# Altium footprint library SOCKET mikroBUS 16 TH.PcbLib: 1 footprints
Each footprint in its own frame and in the unit in brackets; x right, y up, seen from the top. Pads: shape width x height; smd on the part's side, far side on the other; paste and mask are expansions set on the pad; w line width, h text height; cw(c..) or ccw(c..) is an arc to the next point about the centre after c.
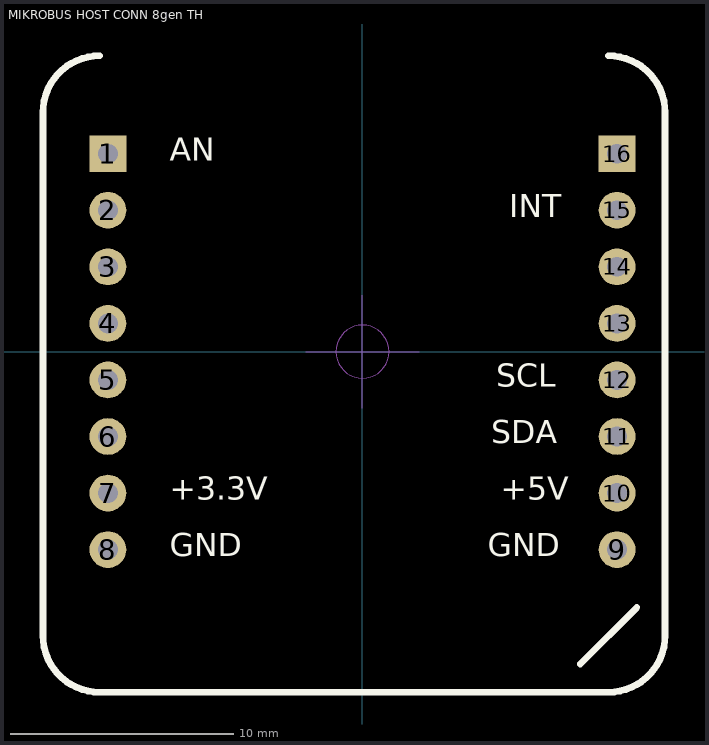
[diagram p0: the footprint, top view; thin cyan lines are the x and y axes]

## MIKROBUS HOST CONN 8gen TH [mil]
height 47.24
pads (16):
  rect 65x65 hole 35: 1(-450,350) 16(450,350)
  round 65 hole 35: 2(-450,250) 3(-450,150) 4(-450,50) 5(-450,-50) 6(-450,-150) 7(-450,-250) 8(-450,-350) 9(450,-350) 10(450,-250) 11(450,-150) 12(450,-50) 13(450,50) 14(450,150) 15(450,250)
Top Overlay:
  lines w12: -565,338 -565,423 cw(c-465,423) -465,523 ; -565,340 -565,-502.01 ccw(c-465,-502) -465,-602 435,-602 ccw(c435,-502) 535,-502 535,340 ; 385,-552 485,-452 ; 435,523 cw(c435,423) 535,423 535,338
  text "AN" at -340.73,323.77 h70
  text "+5V" at 244.27,-276.23 h70
  text "GND" at 221.27,-376.23 h70
  text "INT" at 259.75,223.77 h70
  text "SCL" at 236.75,-76.23 h70
  text "GND" at -340.73,-376.23 h70
  text "+3.3V" at -340.73,-276.23 h70
  text "SDA" at 227.55,-176.23 h70
Mechanical 15:
  circle w2: c0,0 r46.89
  lines w2: -100,0 100,0 ; 0,-100 0,100